# Altium footprint library PCB_ConnectorHDR.PcbLib: 139 footprints (part 4 of 9)
Each footprint in its own frame and in the unit in brackets; x right, y up, seen from the top. Pads: shape width x height; smd on the part's side, far side on the other; paste and mask are expansions set on the pad; w line width, h text height; cw(c..) or ccw(c..) is an arc to the next point about the centre after c.
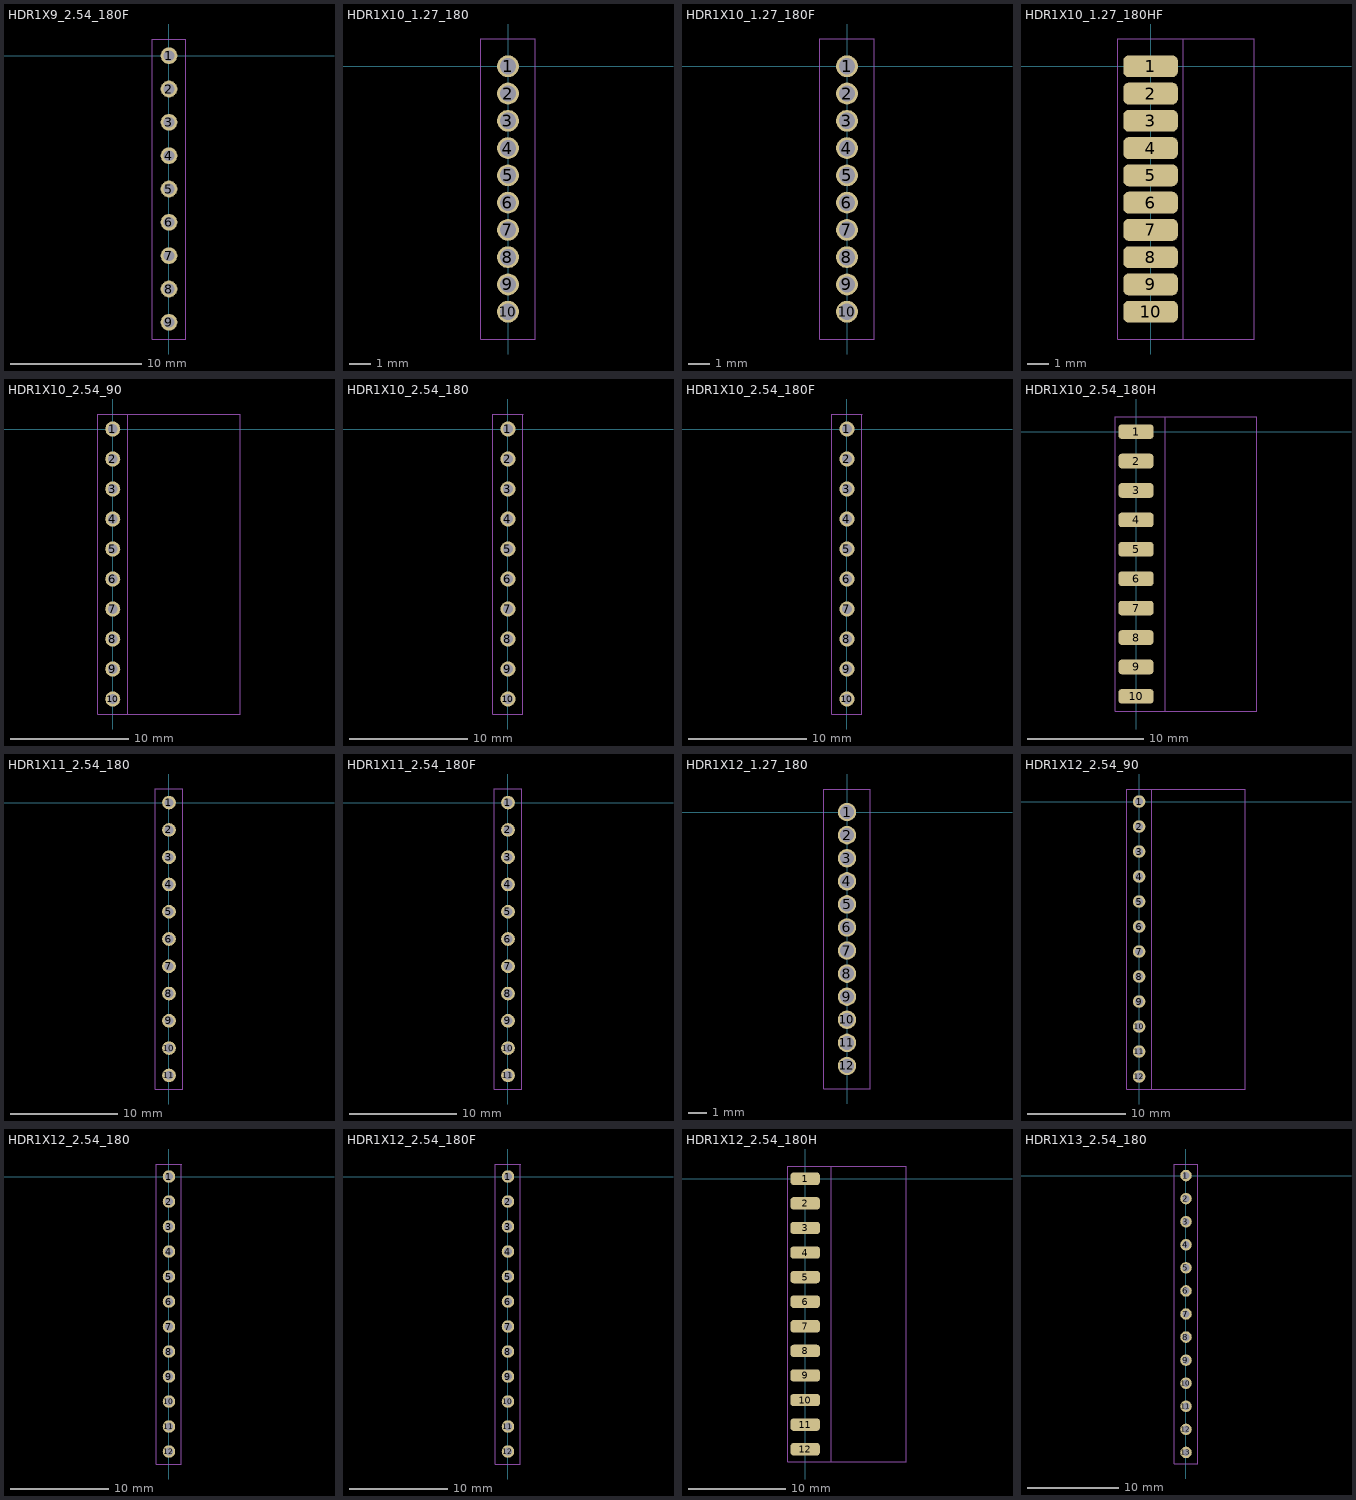
[diagram p3: the footprints below, top view; thin cyan lines are the x and y axes]

## HDR1X9_2.54_180F [mil]
height 169.29
pads (9):
  round 50 hole 32: 1(0,0) 2(0,-100) 3(0,-200) 4(0,-300) 5(0,-400) 6(0,-500) 7(0,-600) 8(0,-700) 9(0,-800)
Mechanical 13:
  lines w2: -50,-850 50,-850 50,50 -50,50 -50,-850
T-Component:
  lines w2: -50,-850 -50,50 50,50 50,-850 -50,-850
  text ".Designator" at -31,-420 h80
3D body "female_header_a-bl254-eg-g09d.stp": height 334.65, standoff -125.98, extent -49.21,-854.92 49.22,54.92

## HDR1X10_1.27_180 [mil]
height 169.29
pads (10):
  round 40 hole 30: 1(0,0) 2(0,-50) 3(0,-100) 4(0,-150) 5(0,-200) 6(0,-250) 7(0,-300) 8(0,-350) 9(0,-400) 10(0,-450)
Mechanical 13:
  lines w2: -50,-500 50,-500 50,50 -50,50 -50,-500
T-Component:
  lines w2: -50,-500 50,-500 50,50 -50,50 -50,-500
  text ".Designator" at -31,-245 h80
3D body "pin_header_a-sl127-eg-g10d.stp": height 210.24, standoff -102.36, extent -49.21,-474.99 49.21,25.01

## HDR1X10_1.27_180F [mil]
height 169.29
pads (10):
  round 40 hole 30: 1(0,0) 2(0,-50) 3(0,-100) 4(0,-150) 5(0,-200) 6(0,-250) 7(0,-300) 8(0,-350) 9(0,-400) 10(0,-450)
Mechanical 13:
  lines w2: -50,-500 -50,50 50,50 50,-500 -50,-500
T-Component:
  lines w2: -50,-500 -50,50 50,50 50,-500 -50,-500
  text ".Designator" at -31,-245 h80
3D body "female_header_a-bl127-eg-g10d.stp": height 133.86, standoff -94.49, extent -35.43,-482.87 35.44,32.88

## HDR1X10_1.27_180HF [mil]
height 169.29
pads (10):
  rrect50% 100x40 smd: 1(0,0) 2(0,-50) 3(0,-100) 4(0,-150) 5(0,-200) 6(0,-250) 7(0,-300) 8(0,-350) 9(0,-400) 10(0,-450)
Mechanical 13:
  lines w2: -60,-500 -60,50 190,50 190,-500 -60,-500
T-Component:
  lines w2: -60,-500 -60,50 60,50 60,-500 -60,-500
  text ".Designator" at -31,-245 h80
3D body "female_header_a-bl127-eg-g10d.stp": height 71.43, standoff 0.57, extent -39.48,-482.88 188.87,32.87

## HDR1X10_2.54_90 [mil]
height 169.29
pads (10):
  round 50 hole 32: 1(0,0) 2(0,-100) 3(0,-200) 4(0,-300) 5(0,-400) 6(0,-500) 7(0,-600) 8(0,-700) 9(0,-800) 10(0,-900)
Mechanical 13:
  lines w2: -50,-950 425,-950 425,50 -50,50 -50,-950
T-Component:
  lines w2: -50,-950 50,-950 50,50 -50,50 -50,-950
  text ".Designator" at -31,-470 h80
3D body "pin_header_aw140-ea-g10g.stp": height 99.21, standoff -93.7, extent -15,-946.06 423.58,46.06

## HDR1X10_2.54_180 [mil]
height 169.29
pads (10):
  round 50 hole 32: 1(0,0) 2(0,-100) 3(0,-200) 4(0,-300) 5(0,-400) 6(0,-500) 7(0,-600) 8(0,-700) 9(0,-800) 10(0,-900)
Mechanical 13:
  lines w2: -50,-950 -50,50 50,50 50,-950 -50,-950
T-Component:
  lines w2: -50,-950 50,-950 50,50 -50,50 -50,-950
  text ".Designator" at -31,-470 h80
3D body "pin_header_aw140-eg-g10d.stp": height 322.83, standoff -118.11, extent -49.18,-950 49.18,50

## HDR1X10_2.54_180F [mil]
height 169.29
pads (10):
  round 50 hole 32: 1(0,0) 2(0,-100) 3(0,-200) 4(0,-300) 5(0,-400) 6(0,-500) 7(0,-600) 8(0,-700) 9(0,-800) 10(0,-900)
Mechanical 13:
  lines w2: -50,-950 -50,50 50,50 50,-950 -50,-950
T-Component:
  lines w2: -50,-950 50,-950 50,50 -50,50 -50,-950
  text ".Designator" at -31,-470 h80
3D body "female_header_a-bl254-eg-g10d.stp": height 334.65, standoff -125.98, extent -49.2,-954.92 49.22,54.92

## HDR1X10_2.54_180H [mil]
height 169.29
pads (10):
  rrect50% 120x50 smd: 1(0,0) 2(0,-100) 3(0,-200) 4(0,-300) 5(0,-400) 6(0,-500) 7(0,-600) 8(0,-700) 9(0,-800) 10(0,-900)
Mechanical 13:
  lines w2: -70,-950 410,-950 410,50 -70,50 -70,-950
T-Component:
  lines w2: -70,-950 -70,50 100,50 100,-950 -70,-950
  text ".Designator" at -26,-470 h80
3D body "pin_header_aw140-eg-g10d.stp": height 61.32, standoff -37.05, extent -35,-950 405.94,50

## HDR1X11_2.54_180 [mil]
height 169.29
pads (11):
  round 50 hole 32: 1(0,0) 2(0,-100) 3(0,-200) 4(0,-300) 5(0,-400) 6(0,-500) 7(0,-600) 8(0,-700) 9(0,-800) 10(0,-900) 11(0,-1000)
Mechanical 13:
  lines w2: -50,-1050 -50,50 50,50 50,-1050 -50,-1050
T-Component:
  lines w2: -50,-1050 -50,50 50,50 50,-1050 -50,-1050
  text ".Designator" at -31,-520 h80
3D body "pin_header_aw140-eg-g11d.stp": height 322.83, standoff -118.11, extent -49.18,-1050 49.18,50

## HDR1X11_2.54_180F [mil]
height 169.29
pads (11):
  round 50 hole 32: 1(0,0) 2(0,-100) 3(0,-200) 4(0,-300) 5(0,-400) 6(0,-500) 7(0,-600) 8(0,-700) 9(0,-800) 10(0,-900) 11(0,-1000)
Mechanical 13:
  lines w2: -50,-1050 -50,50 50,50 50,-1050 -50,-1050
T-Component:
  lines w2: -50,-1050 -50,50 50,50 50,-1050 -50,-1050
  text ".Designator" at -31,-520 h80
3D body "female_header_a-bl254-eg-g11d.stp": height 334.65, standoff -125.98, extent -49.21,-1054.91 49.22,54.92

## HDR1X12_1.27_180 [mil]
height 169.29
pads (12):
  round 40 hole 30: 1(0,0) 2(0,-50) 3(0,-100) 4(0,-150) 5(0,-200) 6(0,-250) 7(0,-300) 8(0,-350) 9(0,-400) 10(0,-450) 11(0,-500) 12(0,-550)
Mechanical 13:
  lines w2: -50,-600 50,-600 50,50 -50,50 -50,-600
T-Component:
  lines w2: -50,-600 50,-600 50,50 -50,50 -50,-600
  text ".Designator" at -31,-295 h80
3D body "pin_header_a-sl127-eg-g12d.stp": height 210.24, standoff -102.36, extent -49.21,-575 49.21,25

## HDR1X12_2.54_90 [mil]
height 169.29
pads (12):
  round 50 hole 32: 1(0,0) 2(0,-100) 3(0,-200) 4(0,-300) 5(0,-400) 6(0,-500) 7(0,-600) 8(0,-700) 9(0,-800) 10(0,-900) 11(0,-1000) 12(0,-1100)
Mechanical 13:
  lines w2: -50,-1150 425,-1150 425,50 -50,50 -50,-1150
T-Component:
  lines w2: -50,-1150 50,-1150 50,50 -50,50 -50,-1150
  text ".Designator" at -26,-570 h80
3D body "pin_header_aw140-ea-g12g.stp": height 99.21, standoff -93.7, extent -15,-1146.06 423.58,46.06

## HDR1X12_2.54_180 [mil]
height 169.29
pads (12):
  round 50 hole 32: 1(0,0) 2(0,-100) 3(0,-200) 4(0,-300) 5(0,-400) 6(0,-500) 7(0,-600) 8(0,-700) 9(0,-800) 10(0,-900) 11(0,-1000) 12(0,-1100)
Mechanical 13:
  lines w2: -50,-1150 50,-1150 50,50 -50,50 -50,-1150
T-Component:
  lines w2: -50,-1150 50,-1150 50,50 -50,50 -50,-1150
  text ".Designator" at -31,-570 h80
3D body "pin_header_aw140-eg-g12d.stp": height 322.83, standoff -118.11, extent -49.18,-1150 49.18,50

## HDR1X12_2.54_180F [mil]
height 169.29
pads (12):
  round 50 hole 32: 1(0,0) 2(0,-100) 3(0,-200) 4(0,-300) 5(0,-400) 6(0,-500) 7(0,-600) 8(0,-700) 9(0,-800) 10(0,-900) 11(0,-1000) 12(0,-1100)
Mechanical 13:
  lines w2: -50,-1150 -50,50 50,50 50,-1150 -50,-1150
T-Component:
  lines w2: -50,-1150 -50,50 50,50 50,-1150 -50,-1150
  text ".Designator" at -31,-570 h80
3D body "female_header_a-bl254-eg-g12d.stp": height 334.65, standoff -125.98, extent -49.21,-1154.92 49.21,54.92

## HDR1X12_2.54_180H [mil]
height 169.29
pads (12):
  rrect50% 120x50 smd: 1(0,0) 2(0,-100) 3(0,-200) 4(0,-300) 5(0,-400) 6(0,-500) 7(0,-600) 8(0,-700) 9(0,-800) 10(0,-900) 11(0,-1000) 12(0,-1100)
Mechanical 13:
  lines w2: -70,-1150 410,-1150 410,50 -70,50 -70,-1150
T-Component:
  lines w2: -70,-1150 -70,50 105,50 105,-1150 -70,-1150
  text ".Designator" at -31,-570 h80
3D body "pin_header_aw140-eg-g12d.stp": height 49.32, standoff -49.05, extent -35,-1150 405.94,50

## HDR1X13_2.54_180 [mil]
height 169.29
pads (13):
  round 50 hole 32: 1(0,0) 2(0,-100) 3(0,-200) 4(0,-300) 5(0,-400) 6(0,-500) 7(0,-600) 8(0,-700) 9(0,-800) 10(0,-900) 11(0,-1000) 12(0,-1100) 13(0,-1200)
Mechanical 13:
  lines w2: -50,-1250 50,-1250 50,50 -50,50 -50,-1250
T-Component:
  lines w2: -50,-1250 -50,50 50,50 50,-1250 -50,-1250
  text ".Designator" at -31,-620 h80
3D body "pin_header_aw140-eg-g13d.stp": height 322.83, standoff -118.11, extent -49.18,-1250 49.18,50